# Altium integrated library Displays.IntLib: 4 symbols
Pins are listed as number, name and electrical type; pins without a type are passive.

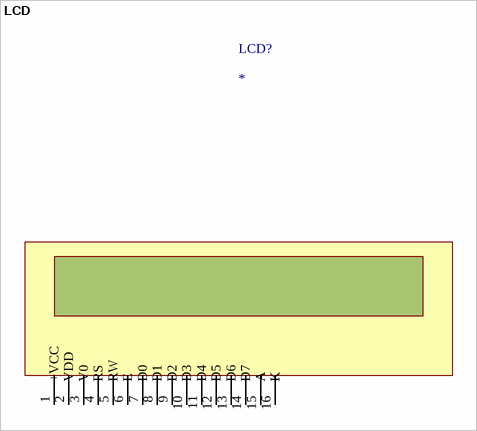
[diagram p0: symbol LCD]

## LCD
designator LCD?
20x4
footprint LCD20x4
pins: 1 +VCC, 2 VDD, 3 V0, 4 RS, 5 RW, 6 E, 7 D0, 8 D1, 9 D2, 10 D3, 11 D4, 12 D5, 13 D6, 14 D7, 15 A, 16 K


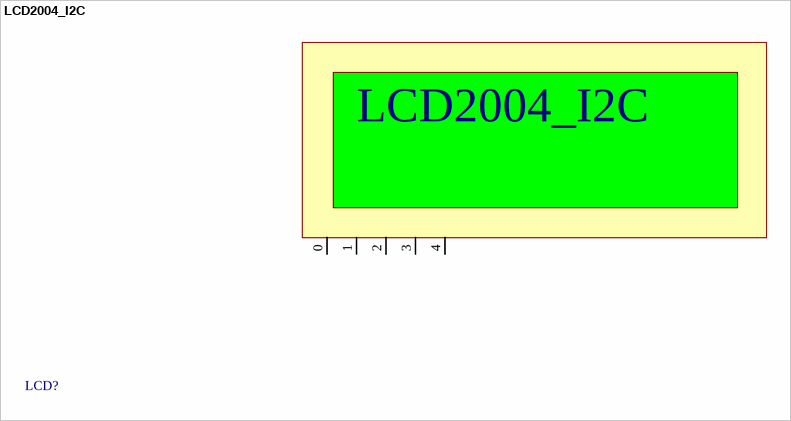
[diagram p1: symbol LCD2004_I2C]

## LCD2004_I2C
designator LCD?, comment 2004_I2C  (value not drawn)
footprint LCD2004_I2C
pins: 0, 1, 2, 3, 4


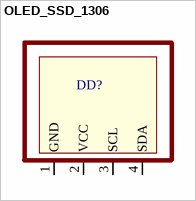
[diagram p2: symbol OLED_SSD_1306]

## OLED_SSD_1306
designator DD?
footprint OLED_128x64_SSD_1306
footprint OLED_128X32
pins: 1 GND, 2 VCC, 3 SCL, 4 SDA


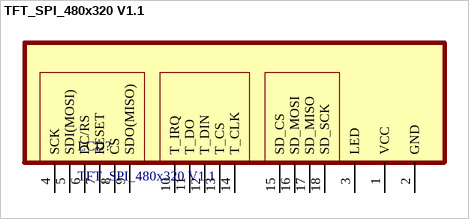
[diagram p3: symbol TFT_SPI_480x320 V1.1]

## TFT_SPI_480x320 V1.1
designator LCD?
footprint LCD_TFT_4.0"
pins: 1 VCC, 2 GND, 3 LED, 4 SCK, 5 SDI(MOSI), 6 DC/RS, 7 RESET, 8 CS, 9 SDO(MISO), 10 T_IRQ, 11 T_DO, 12 T_DIN, 13 T_CS, 14 T_CLK, 15 SD_CS, 16 SD_MOSI, 17 SD_MISO, 18 SD_SCK